# EAGLE library part TPS-TEST1 (library writer_ic)
TPS-TEST1 Step-down converter <3A & 2.5V to 5.5V Source: JLCEDA/EasyEDA Official Library (https://lceda.cn/ , https://easyeda.com). Copyright of the library data belongs to JLCEDA/EasyEDA.
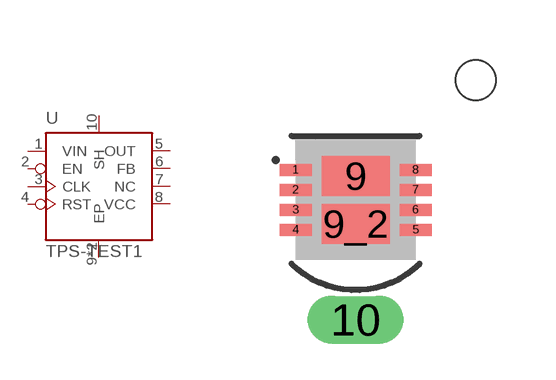
[diagram p0: symbol with the pads of QFN-8-EP_3X3; footprint QFN-8-EP_3X3]

Designator prefix U

## TPS-TEST1 (DATASHEET: https://example.com/ds.pdf?a=1&b=2; LCSC_PART: C000001; MANUFACTURER: Test Mfr & Sons; MPN: TPS-TEST1; PACKAGE: QFN-8; SOURCE: Source: JLCEDA/EasyEDA Official Library (https://lceda.cn/ , https://easyeda.com). Copyright of the library data belongs to JLCEDA/EasyEDA.; SUPPLY_VOLTAGE: 5V)  [QFN-8-EP_3X3]
1  VIN  pwr
2  EN  in
3  CLK  in
4  RST  in
5  OUT  out
6  FB
7  NC  nc
8  VCC  sup
9  EP  pas
9_2  EP  pas
10  SH  pas

## Footprint QFN-8-EP_3X3 (pad centres in mm)
Synthetic 8 pin QFN with thermal pad and a slotted shield pad
smd 0.8 x 0.3: 1 -1.5,0.75; 2 -1.5,0.25; 3 -1.5,-0.25; 4 -1.5,-0.75; 5 1.5,-0.75; 6 1.5,-0.25; 7 1.5,0.25; 8 1.5,0.75
smd 1.7 x 1: 9 0,0.6; 9_2 0,-0.6
drill 0.6 pad 1.2 slot 1.8: 10 0,-3
hole 1 at 3,3